# Altium schematic symbol library 5V电源功率电感_Würth 7447798720.SCHLIB: 1 symbol
Pins are listed as number, name and electrical type; pins without a type are passive.

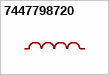
[diagram p0: symbol 7447798720]

## 7447798720
designator L??  (value not drawn)
电感值:7.2uH;精度:±30%;额定电流:7.9A;饱和电流(Isat):6A;类型:-;; Manufacturer: Wurth(伍尔特); AddInBom: yes; ModelId: 669184afeb3a41a69bd447d1aa3c6b52; ModelName: IND-SMD_L10.2-W10.2_7447798720; ModelTransform: 401.574,402.3614,0,270,0,0,0,0,0; Value: 7.2uH; Tolerance: ±30%; Current Rating: 7.9A; Current - Saturation(Isat): 6A; DC Resistance(DCR): 12.8mΩ; Symbol: 7447798720; LCSC Part Name: 7.2uH ±30% 6A; SupplierPart: C105681; ManufacturerPart: 7447798720; Supplier Footprint: SMD,10.2x10.2mm; JLCPCB Part Class: Extended Part; Datasheet: https://www.we-online.com/components/products/datasheet/7447798720.pdf; Supplier: LCSC; ConvertToPcb: yes; FootprintName: IND-SMD_L10.2-W10.2_7447798720; Type: -; Ratings: -
footprint IND-SMD_L10.2-W10.2_7447798720
pins: 1, 2